# Altium footprint library HDRV10W51P200_2X5_1000X400X769P.PcbLib: 1 footprints
Each footprint in its own frame and in the unit in brackets; x right, y up, seen from the top. Pads: shape width x height; smd on the part's side, far side on the other; paste and mask are expansions set on the pad; w line width, h text height; cw(c..) or ccw(c..) is an arc to the next point about the centre after c.
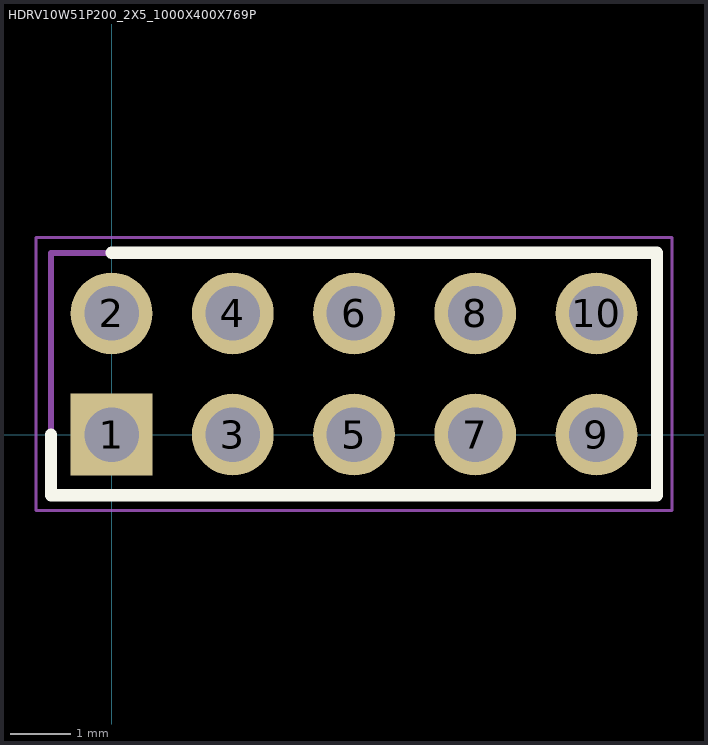
[diagram p0: the footprint, top view; thin cyan lines are the x and y axes]

## HDRV10W51P200_2X5_1000X400X769P [mm]
pads (10):
  rect 1.35x1.35 / inner round 1.35 / far side rect 1.35x1.35 hole 0.9: 1(0,0)
  round 1.35 hole 0.9: 2(0,2) 3(2,0) 4(2,2) 5(4,0) 6(4,2) 7(6,0) 8(6,2) 9(8,0) 10(8,2)
Top Overlay:
  lines w0.2: -1,0 -1,-1 9,-1 9,3 0,3
Mechanical 15:
  lines w0.1: -1,-1 -1,3 9,3 9,-1 -1,-1
Mechanical 20:
  lines w0.05: -1.25,-1.25 -1.25,3.25 9.25,3.25 9.25,-1.25 -1.25,-1.25